# Altium integrated library GPDSE.IntLib: 426 symbols (part 1 of 5)
Pins are listed as number, name and electrical type; pins without a type are passive.

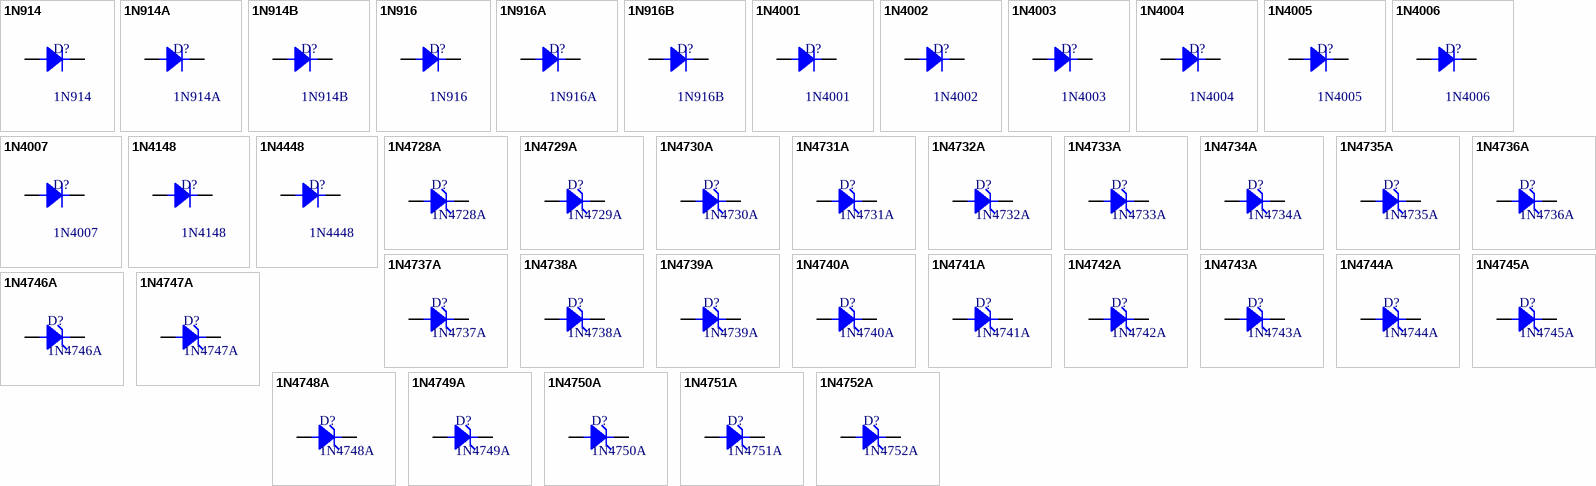
[diagram p0: symbols 1N914 to 1N4752A]

## 1N914
designator D?
Small Signal Diode; Peak Repetitive Reverse Voltage (Vrrm): 100 V; Forward Current (If): 300 mA; Non-Repetitive Peak Forward Surge Current (Ifsm): 1 A; Forward Voltage (Vf): 1 V; Reverse Current (Ir): 25 nA; Total Capacitance (Ct): 4 pF; Max Recovery Time (trr): 4ns
footprint DO-35-Glass (Diode, Axial; Body 3.8 x 1.9 mm (LxDia. max), Lead Dia. 0.53 mm (max), Lead Spacing 7.62 mm)
pins: A, K

## 1N914A
designator D?
Small Signal Diode; Peak Repetitive Reverse Voltage (Vrrm): 100 V; Forward Current (If): 300 mA; Non-Repetitive Peak Forward Surge Current (Ifsm): 1 A; Forward Voltage (Vf): 1 V; Reverse Current (Ir): 25 nA; Total Capacitance (Ct): 4 pF; Max Recovery Time (trr): 4ns
footprint DO-35-Glass (Diode, Axial; Body 3.8 x 1.9 mm (LxDia. max), Lead Dia. 0.53 mm (max), Lead Spacing 7.62 mm)
pins: A, K

## 1N914B
designator D?
Small Signal Diode; Peak Repetitive Reverse Voltage (Vrrm): 100 V; Forward Current (If): 300 mA; Non-Repetitive Peak Forward Surge Current (Ifsm): 1 A; Forward Voltage (Vf): 0.72 V; Reverse Current (Ir): 25 nA; Total Capacitance (Ct): 4 pF; Max Recovery Time (trr): 4ns
footprint DO-35-Glass (Diode, Axial; Body 3.8 x 1.9 mm (LxDia. max), Lead Dia. 0.53 mm (max), Lead Spacing 7.62 mm)
pins: A, K

## 1N916
designator D?
Small Signal Diode; Peak Repetitive Reverse Voltage (Vrrm): 100 V; Forward Current (If): 300 mA; Non-Repetitive Peak Forward Surge Current (Ifsm): 1 A; Forward Voltage (Vf): 1 V; Reverse Current (Ir): 25 nA; Total Capacitance (Ct): 2 pF; Max Recovery Time (trr): 4ns
footprint DO-35-Glass (Diode, Axial; Body 3.8 x 1.9 mm (LxDia. max), Lead Dia. 0.53 mm (max), Lead Spacing 7.62 mm)
pins: A, K

## 1N916A
designator D?
Small Signal Diode; Peak Repetitive Reverse Voltage (Vrrm): 100 V; Forward Current (If): 300 mA; Non-Repetitive Peak Forward Surge Current (Ifsm): 1 A; Forward Voltage (Vf): 1 V; Reverse Current (Ir): 25 nA; Total Capacitance (Ct): 2 pF; Max Recovery Time (trr): 4ns
footprint DO-35-Glass (Diode, Axial; Body 3.8 x 1.9 mm (LxDia. max), Lead Dia. 0.53 mm (max), Lead Spacing 7.62 mm)
pins: A, K

## 1N916B
designator D?
Small Signal Diode; Peak Repetitive Reverse Voltage (Vrrm): 100 V; Forward Current (If): 300 mA; Non-Repetitive Peak Forward Surge Current (Ifsm): 1 A; Forward Voltage (Vf): 0.73 V; Reverse Current (Ir): 25 nA; Total Capacitance (Ct): 2 pF; Max Recovery Time (trr): 4ns
footprint DO-35-Glass (Diode, Axial; Body 3.8 x 1.9 mm (LxDia. max), Lead Dia. 0.53 mm (max), Lead Spacing 7.62 mm)
pins: A, K

## 1N4001
designator D?
General Purpose Rectifier; Peak Repetitive Reverse Voltage (Vrrm): 50 V; Forward Current (If): 1 A; Non-Repetitive Peak Forward Surge Current (Ifsm): 30 A; Forward Voltage (Vf): 1.1 V; Reverse Current (Ir): 5 uA; Total Capacitance (Ct): 15 pF
footprint DO-41-Plastic (Diode, Axial; Body 4.1 x 2.6 mm (LxDia. max), Lead Dia. 1.14 mm (max), Lead Spacing 7.62 mm)
pins: A, K

## 1N4002
designator D?
General Purpose Rectifier; Peak Repetitive Reverse Voltage (Vrrm): 100 V; Forward Current (If): 1 A; Non-Repetitive Peak Forward Surge Current (Ifsm): 30 A; Forward Voltage (Vf): 1.1 V; Reverse Current (Ir): 5 uA; Total Capacitance (Ct): 15 pF
footprint DO-41-Plastic (Diode, Axial; Body 4.1 x 2.6 mm (LxDia. max), Lead Dia. 1.14 mm (max), Lead Spacing 7.62 mm)
pins: A, K

## 1N4003
designator D?
General Purpose Rectifier; Peak Repetitive Reverse Voltage (Vrrm): 200 V; Forward Current (If): 1 A; Non-Repetitive Peak Forward Surge Current (Ifsm): 30 A; Forward Voltage (Vf): 1.1 V; Reverse Current (Ir): 5 uA; Total Capacitance (Ct): 15 pF
footprint DO-41-Plastic (Diode, Axial; Body 4.1 x 2.6 mm (LxDia. max), Lead Dia. 1.14 mm (max), Lead Spacing 7.62 mm)
pins: A, K

## 1N4004
designator D?
General Purpose Rectifier; Peak Repetitive Reverse Voltage (Vrrm): 400 V; Forward Current (If): 1 A; Non-Repetitive Peak Forward Surge Current (Ifsm): 30 A; Forward Voltage (Vf): 1.1 V; Reverse Current (Ir): 5 uA; Total Capacitance (Ct): 15 pF
footprint DO-41-Plastic (Diode, Axial; Body 4.1 x 2.6 mm (LxDia. max), Lead Dia. 1.14 mm (max), Lead Spacing 7.62 mm)
pins: A, K

## 1N4005
designator D?
General Purpose Rectifier; Peak Repetitive Reverse Voltage (Vrrm): 600 V; Forward Current (If): 1 A; Non-Repetitive Peak Forward Surge Current (Ifsm): 30 A; Forward Voltage (Vf): 1.1 V; Reverse Current (Ir): 5 uA; Total Capacitance (Ct): 15 pF
footprint DO-41-Plastic (Diode, Axial; Body 4.1 x 2.6 mm (LxDia. max), Lead Dia. 1.14 mm (max), Lead Spacing 7.62 mm)
pins: A, K

## 1N4006
designator D?
General Purpose Rectifier; Peak Repetitive Reverse Voltage (Vrrm): 800 V; Forward Current (If): 1 A; Non-Repetitive Peak Forward Surge Current (Ifsm): 30 A; Forward Voltage (Vf): 1.1 V; Reverse Current (Ir): 5 uA; Total Capacitance (Ct): 15 pF
footprint DO-41-Plastic (Diode, Axial; Body 4.1 x 2.6 mm (LxDia. max), Lead Dia. 1.14 mm (max), Lead Spacing 7.62 mm)
pins: A, K

## 1N4007
designator D?
General Purpose Rectifier; Peak Repetitive Reverse Voltage (Vrrm): 1000 V; Forward Current (If): 1 A; Non-Repetitive Peak Forward Surge Current (Ifsm): 30 A; Forward Voltage (Vf): 1.1 V; Reverse Current (Ir): 5 uA; Total Capacitance (Ct): 15 pF
footprint DO-41-Plastic (Diode, Axial; Body 4.1 x 2.6 mm (LxDia. max), Lead Dia. 1.14 mm (max), Lead Spacing 7.62 mm)
pins: A, K

## 1N4148
designator D?
Small Signal Diode; Peak Repetitive Reverse Voltage (Vrrm): 100 V; Forward Current (If): 300 mA; Non-Repetitive Peak Forward Surge Current (Ifsm): 1 A; Forward Voltage (Vf): 1 V; Reverse Current (Ir): 25 nA; Total Capacitance (Ct): 4 pF; Max Recovery Time (trr): 4ns
footprint DO-35-Glass (Diode, Axial; Body 3.8 x 1.9 mm (LxDia. max), Lead Dia. 0.53 mm (max), Lead Spacing 7.62 mm)
pins: A, K

## 1N4448
designator D?
Small Signal Diode; Peak Repetitive Reverse Voltage (Vrrm): 100 V; Forward Current (If): 300 mA; Non-Repetitive Peak Forward Surge Current (Ifsm): 1 A; Forward Voltage (Vf): 1 V; Reverse Current (Ir): 25 nA; Total Capacitance (Ct): 2 pF; Max Recovery Time (trr): 4ns
footprint DO-35-Glass (Diode, Axial; Body 3.8 x 1.9 mm (LxDia. max), Lead Dia. 0.53 mm (max), Lead Spacing 7.62 mm)
pins: A, K

## 1N4728A
designator D?
Zener Diode; Zener Voltage (Vz): 3.3 V; Zener Current (Iz): 276 mA; Power Dissipation (Pd): 1.3 W; Forward Voltage (Vf): 1.2 V
footprint DO-41-Glass (Diode, Axial; Body 4.1 x 2.6 mm (LxDia. max), Lead Dia. 1.14 mm (max), Lead Spacing 7.62 mm)
pins: A, K

## 1N4729A
designator D?
Zener Diode; Zener Voltage (Vz): 3.6 V; Zener Current (Iz): 252 mA; Power Dissipation (Pd): 1.3 W; Forward Voltage (Vf): 1.2 V
footprint DO-41-Glass (Diode, Axial; Body 4.1 x 2.6 mm (LxDia. max), Lead Dia. 1.14 mm (max), Lead Spacing 7.62 mm)
pins: A, K

## 1N4730A
designator D?
Zener Diode; Zener Voltage (Vz): 3.9 V; Zener Current (Iz): 234 mA; Power Dissipation (Pd): 1.3 W; Forward Voltage (Vf): 1.2 V
footprint DO-41-Glass (Diode, Axial; Body 4.1 x 2.6 mm (LxDia. max), Lead Dia. 1.14 mm (max), Lead Spacing 7.62 mm)
pins: A, K

## 1N4731A
designator D?
Zener Diode; Zener Voltage (Vz): 4.3 V; Zener Current (Iz): 217 mA; Power Dissipation (Pd): 1.3 W; Forward Voltage (Vf): 1.2 V
footprint DO-41-Glass (Diode, Axial; Body 4.1 x 2.6 mm (LxDia. max), Lead Dia. 1.14 mm (max), Lead Spacing 7.62 mm)
pins: A, K

## 1N4732A
designator D?
Zener Diode; Zener Voltage (Vz): 4.7 V; Zener Current (Iz): 193 mA; Power Dissipation (Pd): 1.3 W; Forward Voltage (Vf): 1.2 V
footprint DO-41-Glass (Diode, Axial; Body 4.1 x 2.6 mm (LxDia. max), Lead Dia. 1.14 mm (max), Lead Spacing 7.62 mm)
pins: A, K

## 1N4733A
designator D?
Zener Diode; Zener Voltage (Vz): 5.1 V; Zener Current (Iz): 178 mA; Power Dissipation (Pd): 1.3 W; Forward Voltage (Vf): 1.2 V
footprint DO-41-Glass (Diode, Axial; Body 4.1 x 2.6 mm (LxDia. max), Lead Dia. 1.14 mm (max), Lead Spacing 7.62 mm)
pins: A, K

## 1N4734A
designator D?
Zener Diode; Zener Voltage (Vz): 5.6 V; Zener Current (Iz): 162 mA; Power Dissipation (Pd): 1.3 W; Forward Voltage (Vf): 1.2 V
footprint DO-41-Glass (Diode, Axial; Body 4.1 x 2.6 mm (LxDia. max), Lead Dia. 1.14 mm (max), Lead Spacing 7.62 mm)
pins: A, K

## 1N4735A
designator D?
Zener Diode; Zener Voltage (Vz): 6.2 V; Zener Current (Iz): 146 mA; Power Dissipation (Pd): 1.3 W; Forward Voltage (Vf): 1.2 V
footprint DO-41-Glass (Diode, Axial; Body 4.1 x 2.6 mm (LxDia. max), Lead Dia. 1.14 mm (max), Lead Spacing 7.62 mm)
pins: A, K

## 1N4736A
designator D?
Zener Diode; Zener Voltage (Vz): 6.8 V; Zener Current (Iz): 133 mA; Power Dissipation (Pd): 1.3 W; Forward Voltage (Vf): 1.2 V
footprint DO-41-Glass (Diode, Axial; Body 4.1 x 2.6 mm (LxDia. max), Lead Dia. 1.14 mm (max), Lead Spacing 7.62 mm)
pins: A, K

## 1N4737A
designator D?
Zener Diode; Zener Voltage (Vz): 7.5 V; Zener Current (Iz): 121 mA; Power Dissipation (Pd): 1.3 W; Forward Voltage (Vf): 1.2 V
footprint DO-41-Glass (Diode, Axial; Body 4.1 x 2.6 mm (LxDia. max), Lead Dia. 1.14 mm (max), Lead Spacing 7.62 mm)
pins: A, K

## 1N4738A
designator D?
Zener Diode; Zener Voltage (Vz): 8.2 V; Zener Current (Iz): 110 mA; Power Dissipation (Pd): 1.3 W; Forward Voltage (Vf): 1.2 V
footprint DO-41-Glass (Diode, Axial; Body 4.1 x 2.6 mm (LxDia. max), Lead Dia. 1.14 mm (max), Lead Spacing 7.62 mm)
pins: A, K

## 1N4739A
designator D?
Zener Diode; Zener Voltage (Vz): 9.1 V; Zener Current (Iz): 100 mA; Power Dissipation (Pd): 1.3 W; Forward Voltage (Vf): 1.2 V
footprint DO-41-Glass (Diode, Axial; Body 4.1 x 2.6 mm (LxDia. max), Lead Dia. 1.14 mm (max), Lead Spacing 7.62 mm)
pins: A, K

## 1N4740A
designator D?
Zener Diode; Zener Voltage (Vz): 10 V; Zener Current (Iz): 91 mA; Power Dissipation (Pd): 1.3 W; Forward Voltage (Vf): 1.2 V
footprint DO-41-Glass (Diode, Axial; Body 4.1 x 2.6 mm (LxDia. max), Lead Dia. 1.14 mm (max), Lead Spacing 7.62 mm)
pins: A, K

## 1N4741A
designator D?
Zener Diode; Zener Voltage (Vz): 11 V; Zener Current (Iz): 83 mA; Power Dissipation (Pd): 1.3 W; Forward Voltage (Vf): 1.2 V
footprint DO-41-Glass (Diode, Axial; Body 4.1 x 2.6 mm (LxDia. max), Lead Dia. 1.14 mm (max), Lead Spacing 7.62 mm)
pins: A, K

## 1N4742A
designator D?
Zener Diode; Zener Voltage (Vz): 12 V; Zener Current (Iz): 76 mA; Power Dissipation (Pd): 1.3 W; Forward Voltage (Vf): 1.2 V
footprint DO-41-Glass (Diode, Axial; Body 4.1 x 2.6 mm (LxDia. max), Lead Dia. 1.14 mm (max), Lead Spacing 7.62 mm)
pins: A, K

## 1N4743A
designator D?
Zener Diode; Zener Voltage (Vz): 13 V; Zener Current (Iz): 69 mA; Power Dissipation (Pd): 1.3 W; Forward Voltage (Vf): 1.2 V
footprint DO-41-Glass (Diode, Axial; Body 4.1 x 2.6 mm (LxDia. max), Lead Dia. 1.14 mm (max), Lead Spacing 7.62 mm)
pins: A, K

## 1N4744A
designator D?
Zener Diode; Zener Voltage (Vz): 15 V; Zener Current (Iz): 61 mA; Power Dissipation (Pd): 1.3 W; Forward Voltage (Vf): 1.2 V
footprint DO-41-Glass (Diode, Axial; Body 4.1 x 2.6 mm (LxDia. max), Lead Dia. 1.14 mm (max), Lead Spacing 7.62 mm)
pins: A, K

## 1N4745A
designator D?
Zener Diode; Zener Voltage (Vz): 16 V; Zener Current (Iz): 57 mA; Power Dissipation (Pd): 1.3 W; Forward Voltage (Vf): 1.2 V
footprint DO-41-Glass (Diode, Axial; Body 4.1 x 2.6 mm (LxDia. max), Lead Dia. 1.14 mm (max), Lead Spacing 7.62 mm)
pins: A, K

## 1N4746A
designator D?
Zener Diode; Zener Voltage (Vz): 18 V; Zener Current (Iz): 50 mA; Power Dissipation (Pd): 1.3 W; Forward Voltage (Vf): 1.2 V
footprint DO-41-Glass (Diode, Axial; Body 4.1 x 2.6 mm (LxDia. max), Lead Dia. 1.14 mm (max), Lead Spacing 7.62 mm)
pins: A, K

## 1N4747A
designator D?
Zener Diode; Zener Voltage (Vz): 20 V; Zener Current (Iz): 45 mA; Power Dissipation (Pd): 1.3 W; Forward Voltage (Vf): 1.2 V
footprint DO-41-Glass (Diode, Axial; Body 4.1 x 2.6 mm (LxDia. max), Lead Dia. 1.14 mm (max), Lead Spacing 7.62 mm)
pins: A, K

## 1N4748A
designator D?
Zener Diode; Zener Voltage (Vz): 22 V; Zener Current (Iz): 41 mA; Power Dissipation (Pd): 1.3 W; Forward Voltage (Vf): 1.2 V
footprint DO-41-Glass (Diode, Axial; Body 4.1 x 2.6 mm (LxDia. max), Lead Dia. 1.14 mm (max), Lead Spacing 7.62 mm)
pins: A, K

## 1N4749A
designator D?
Zener Diode; Zener Voltage (Vz): 24 V; Zener Current (Iz): 38 mA; Power Dissipation (Pd): 1.3 W; Forward Voltage (Vf): 1.2 V
footprint DO-41-Glass (Diode, Axial; Body 4.1 x 2.6 mm (LxDia. max), Lead Dia. 1.14 mm (max), Lead Spacing 7.62 mm)
pins: A, K

## 1N4750A
designator D?
Zener Diode; Zener Voltage (Vz): 27 V; Zener Current (Iz): 34 mA; Power Dissipation (Pd): 1.3 W; Forward Voltage (Vf): 1.2 V
footprint DO-41-Glass (Diode, Axial; Body 4.1 x 2.6 mm (LxDia. max), Lead Dia. 1.14 mm (max), Lead Spacing 7.62 mm)
pins: A, K

## 1N4751A
designator D?
Zener Diode; Zener Voltage (Vz): 30 V; Zener Current (Iz): 30 mA; Power Dissipation (Pd): 1.3 W; Forward Voltage (Vf): 1.2 V
footprint DO-41-Glass (Diode, Axial; Body 4.1 x 2.6 mm (LxDia. max), Lead Dia. 1.14 mm (max), Lead Spacing 7.62 mm)
pins: A, K

## 1N4752A
designator D?
Zener Diode; Zener Voltage (Vz): 33 V; Zener Current (Iz): 27 mA; Power Dissipation (Pd): 1.3 W; Forward Voltage (Vf): 1.2 V
footprint DO-41-Glass (Diode, Axial; Body 4.1 x 2.6 mm (LxDia. max), Lead Dia. 1.14 mm (max), Lead Spacing 7.62 mm)
pins: A, K

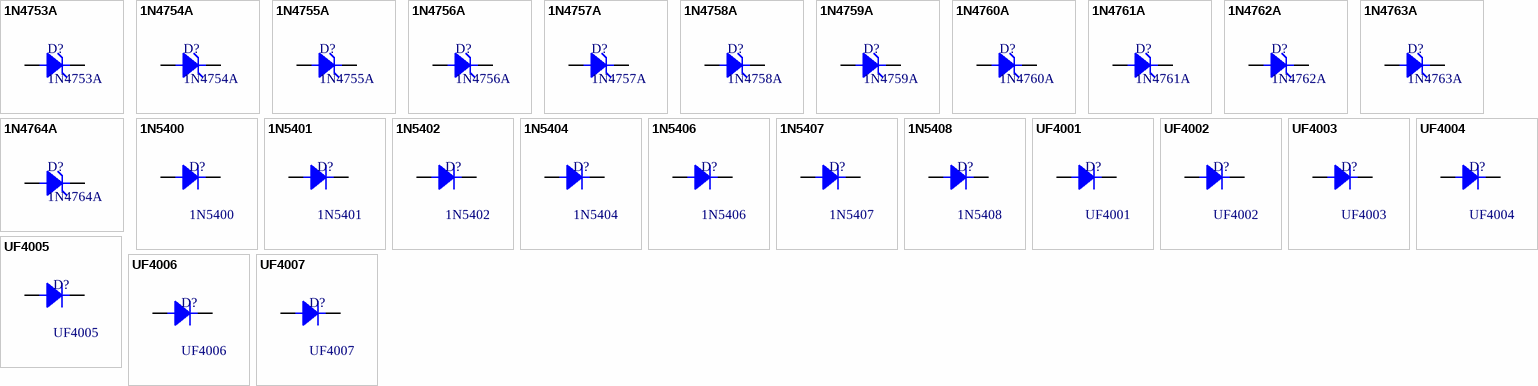
[diagram p1: symbols 1N4753A to UF4007]

## 1N4753A
designator D?
Zener Diode; Zener Voltage (Vz): 36 V; Zener Current (Iz): 25 mA; Power Dissipation (Pd): 1.3 W; Forward Voltage (Vf): 1.2 V
footprint DO-41-Glass (Diode, Axial; Body 4.1 x 2.6 mm (LxDia. max), Lead Dia. 1.14 mm (max), Lead Spacing 7.62 mm)
pins: A, K

## 1N4754A
designator D?
Zener Diode; Zener Voltage (Vz): 39 V; Zener Current (Iz): 23 mA; Power Dissipation (Pd): 1.3 W; Forward Voltage (Vf): 1.2 V
footprint DO-41-Glass (Diode, Axial; Body 4.1 x 2.6 mm (LxDia. max), Lead Dia. 1.14 mm (max), Lead Spacing 7.62 mm)
pins: A, K

## 1N4755A
designator D?
Zener Diode; Zener Voltage (Vz): 43 V; Zener Current (Iz): 22 mA; Power Dissipation (Pd): 1.3 W; Forward Voltage (Vf): 1.2 V
footprint DO-41-Glass (Diode, Axial; Body 4.1 x 2.6 mm (LxDia. max), Lead Dia. 1.14 mm (max), Lead Spacing 7.62 mm)
pins: A, K

## 1N4756A
designator D?
Zener Diode; Zener Voltage (Vz): 47 V; Zener Current (Iz): 19 mA; Power Dissipation (Pd): 1.3 W; Forward Voltage (Vf): 1.2 V
footprint DO-41-Glass (Diode, Axial; Body 4.1 x 2.6 mm (LxDia. max), Lead Dia. 1.14 mm (max), Lead Spacing 7.62 mm)
pins: A, K

## 1N4757A
designator D?
Zener Diode; Zener Voltage (Vz): 51 V; Zener Current (Iz): 18 mA; Power Dissipation (Pd): 1.3 W; Forward Voltage (Vf): 1.2 V
footprint DO-41-Glass (Diode, Axial; Body 4.1 x 2.6 mm (LxDia. max), Lead Dia. 1.14 mm (max), Lead Spacing 7.62 mm)
pins: A, K

## 1N4758A
designator D?
Zener Diode; Zener Voltage (Vz): 56 V; Zener Current (Iz): 16 mA; Power Dissipation (Pd): 1.3 W; Forward Voltage (Vf): 1.2 V
footprint DO-41-Glass (Diode, Axial; Body 4.1 x 2.6 mm (LxDia. max), Lead Dia. 1.14 mm (max), Lead Spacing 7.62 mm)
pins: A, K

## 1N4759A
designator D?
Zener Diode; Zener Voltage (Vz): 62 V; Zener Current (Iz): 14 mA; Power Dissipation (Pd): 1.3 W; Forward Voltage (Vf): 1.2 V
footprint DO-41-Glass (Diode, Axial; Body 4.1 x 2.6 mm (LxDia. max), Lead Dia. 1.14 mm (max), Lead Spacing 7.62 mm)
pins: A, K

## 1N4760A
designator D?
Zener Diode; Zener Voltage (Vz): 68 V; Zener Current (Iz): 13 mA; Power Dissipation (Pd): 1.3 W; Forward Voltage (Vf): 1.2 V
footprint DO-41-Glass (Diode, Axial; Body 4.1 x 2.6 mm (LxDia. max), Lead Dia. 1.14 mm (max), Lead Spacing 7.62 mm)
pins: A, K

## 1N4761A
designator D?
Zener Diode; Zener Voltage (Vz): 75 V; Zener Current (Iz): 12 mA; Power Dissipation (Pd): 1.3 W; Forward Voltage (Vf): 1.2 V
footprint DO-41-Glass (Diode, Axial; Body 4.1 x 2.6 mm (LxDia. max), Lead Dia. 1.14 mm (max), Lead Spacing 7.62 mm)
pins: A, K

## 1N4762A
designator D?
Zener Diode; Zener Voltage (Vz): 82 V; Zener Current (Iz): 11 mA; Power Dissipation (Pd): 1.3 W; Forward Voltage (Vf): 1.2 V
footprint DO-41-Glass (Diode, Axial; Body 4.1 x 2.6 mm (LxDia. max), Lead Dia. 1.14 mm (max), Lead Spacing 7.62 mm)
pins: A, K

## 1N4763A
designator D?
Zener Diode; Zener Voltage (Vz): 91 V; Zener Current (Iz): 10 mA; Power Dissipation (Pd): 1.3 W; Forward Voltage (Vf): 1.2 V
footprint DO-41-Glass (Diode, Axial; Body 4.1 x 2.6 mm (LxDia. max), Lead Dia. 1.14 mm (max), Lead Spacing 7.62 mm)
pins: A, K

## 1N4764A
designator D?
Zener Diode; Zener Voltage (Vz): 100 V; Zener Current (Iz): 9 mA; Power Dissipation (Pd): 1.3 W; Forward Voltage (Vf): 1.2 V
footprint DO-41-Glass (Diode, Axial; Body 4.1 x 2.6 mm (LxDia. max), Lead Dia. 1.14 mm (max), Lead Spacing 7.62 mm)
pins: A, K

## 1N5400
designator D?
3 Amp Rectifier; Forward Current (If): 3 A; Forward Voltage (Vf): 1 V; Non-Repetitive Peak Forward Surge Current (Ifsm): 200 A; Peak Repetitive Reverse Voltage (Vrrm): 50 V; Reverse Current (Ir): 10 uA; Total Capacitance (Ct): 50 pF
footprint DO-201-Plastic (Diode, Axial; Body 9.5 x 5.3 mm (LxDia. max), Lead Dia. 1.30 mm (max), Lead Spacing 15.24 mm)
pins: A, K

## 1N5401
designator D?
3 Amp Rectifier; Forward Current (If): 3 A; Forward Voltage (Vf): 1 V; Non-Repetitive Peak Forward Surge Current (Ifsm): 200 A; Peak Repetitive Reverse Voltage (Vrrm): 100 V; Reverse Current (Ir): 10 uA; Total Capacitance (Ct): 50 pF
footprint DO-201-Plastic (Diode, Axial; Body 9.5 x 5.3 mm (LxDia. max), Lead Dia. 1.30 mm (max), Lead Spacing 15.24 mm)
pins: A, K

## 1N5402
designator D?
3 Amp Rectifier; Forward Current (If): 3 A; Forward Voltage (Vf): 1 V; Non-Repetitive Peak Forward Surge Current (Ifsm): 200 A; Peak Repetitive Reverse Voltage (Vrrm): 200 V; Reverse Current (Ir): 10 uA; Total Capacitance (Ct): 50 pF
footprint DO-201-Plastic (Diode, Axial; Body 9.5 x 5.3 mm (LxDia. max), Lead Dia. 1.30 mm (max), Lead Spacing 15.24 mm)
pins: A, K

## 1N5404
designator D?
3 Amp Rectifier; Forward Current (If): 3 A; Forward Voltage (Vf): 1 V; Non-Repetitive Peak Forward Surge Current (Ifsm): 200 A; Peak Repetitive Reverse Voltage (Vrrm): 400 V; Reverse Current (Ir): 10 uA; Total Capacitance (Ct): 50 pF
footprint DO-201-Plastic (Diode, Axial; Body 9.5 x 5.3 mm (LxDia. max), Lead Dia. 1.30 mm (max), Lead Spacing 15.24 mm)
pins: A, K

## 1N5406
designator D?
3 Amp Rectifier; Forward Current (If): 3 A; Forward Voltage (Vf): 1 V; Non-Repetitive Peak Forward Surge Current (Ifsm): 200 A; Peak Repetitive Reverse Voltage (Vrrm): 600 V; Reverse Current (Ir): 10 uA; Total Capacitance (Ct): 25 pF
footprint DO-201-Plastic (Diode, Axial; Body 9.5 x 5.3 mm (LxDia. max), Lead Dia. 1.30 mm (max), Lead Spacing 15.24 mm)
pins: A, K

## 1N5407
designator D?
3 Amp Rectifier; Forward Current (If): 3 A; Forward Voltage (Vf): 1 V; Non-Repetitive Peak Forward Surge Current (Ifsm): 200 A; Peak Repetitive Reverse Voltage (Vrrm): 800 V; Reverse Current (Ir): 10 uA; Total Capacitance (Ct): 25 pF
footprint DO-201-Plastic (Diode, Axial; Body 9.5 x 5.3 mm (LxDia. max), Lead Dia. 1.30 mm (max), Lead Spacing 15.24 mm)
pins: A, K

## 1N5408
designator D?
3 Amp Rectifier; Forward Current (If): 3 A; Forward Voltage (Vf): 1 V; Non-Repetitive Peak Forward Surge Current (Ifsm): 200 A; Peak Repetitive Reverse Voltage (Vrrm): 1000 V; Reverse Current (Ir): 10 uA; Total Capacitance (Ct): 25 pF
footprint DO-201-Plastic (Diode, Axial; Body 9.5 x 5.3 mm (LxDia. max), Lead Dia. 1.30 mm (max), Lead Spacing 15.24 mm)
pins: A, K

## UF4001
designator D?
Ultrafast Plastic Rectifier; Peak Repetitive Reverse Voltage (Vrrm): 50 V; Forward Current (If): 1 A; Non-Repetitive Peak Forward Surge Current (Ifsm): 30 A; Forward Voltage (Vf): 1 V; Reverse Current (Ir): 10 uA; Total Capacitance (Ct): 17 pF; Max Recovery Time (trr): 50ns
footprint DO-41-Plastic (Diode, Axial; Body 4.1 x 2.6 mm (LxDia. max), Lead Dia. 1.14 mm (max), Lead Spacing 7.62 mm)
pins: A, K

## UF4002
designator D?
Ultrafast Plastic Rectifier; Peak Repetitive Reverse Voltage (Vrrm): 100 V; Forward Current (If): 1 A; Non-Repetitive Peak Forward Surge Current (Ifsm): 30 A; Forward Voltage (Vf): 1 V; Reverse Current (Ir): 10 uA; Total Capacitance (Ct): 17 pF; Max Recovery Time (trr): 50ns
footprint DO-41-Plastic (Diode, Axial; Body 4.1 x 2.6 mm (LxDia. max), Lead Dia. 1.14 mm (max), Lead Spacing 7.62 mm)
pins: A, K

## UF4003
designator D?
Ultrafast Plastic Rectifier; Peak Repetitive Reverse Voltage (Vrrm): 200 V; Forward Current (If): 1 A; Non-Repetitive Peak Forward Surge Current (Ifsm): 30 A; Forward Voltage (Vf): 1 V; Reverse Current (Ir): 10 uA; Total Capacitance (Ct): 17 pF; Max Recovery Time (trr): 50ns
footprint DO-41-Plastic (Diode, Axial; Body 4.1 x 2.6 mm (LxDia. max), Lead Dia. 1.14 mm (max), Lead Spacing 7.62 mm)
pins: A, K

## UF4004
designator D?
Ultrafast Plastic Rectifier; Peak Repetitive Reverse Voltage (Vrrm): 400 V; Forward Current (If): 1 A; Non-Repetitive Peak Forward Surge Current (Ifsm): 30 A; Forward Voltage (Vf): 1 V; Reverse Current (Ir): 10 uA; Total Capacitance (Ct): 17 pF; Max Recovery Time (trr): 50ns
footprint DO-41-Plastic (Diode, Axial; Body 4.1 x 2.6 mm (LxDia. max), Lead Dia. 1.14 mm (max), Lead Spacing 7.62 mm)
pins: A, K

## UF4005
designator D?
Ultrafast Plastic Rectifier; Peak Repetitive Reverse Voltage (Vrrm): 600 V; Forward Current (If): 1 A; Non-Repetitive Peak Forward Surge Current (Ifsm): 30 A; Forward Voltage (Vf): 1.7 V; Reverse Current (Ir): 10 uA; Total Capacitance (Ct): 17 pF; Max Recovery Time (trr): 74ns
footprint DO-41-Plastic (Diode, Axial; Body 4.1 x 2.6 mm (LxDia. max), Lead Dia. 1.14 mm (max), Lead Spacing 7.62 mm)
pins: A, K

## UF4006
designator D?
Ultrafast Plastic Rectifier; Peak Repetitive Reverse Voltage (Vrrm): 800 V; Forward Current (If): 1 A; Non-Repetitive Peak Forward Surge Current (Ifsm): 30 A; Forward Voltage (Vf): 1.7 V; Reverse Current (Ir): 10 uA; Total Capacitance (Ct): 17 pF; Max Recovery Time (trr): 75ns
footprint DO-41-Plastic (Diode, Axial; Body 4.1 x 2.6 mm (LxDia. max), Lead Dia. 1.14 mm (max), Lead Spacing 7.62 mm)
pins: A, K

## UF4007
designator D?
Ultrafast Plastic Rectifier; Peak Repetitive Reverse Voltage (Vrrm): 1000 V; Forward Current (If): 1 A; Non-Repetitive Peak Forward Surge Current (Ifsm): 30 A; Forward Voltage (Vf): 1.7 V; Reverse Current (Ir): 10 uA; Total Capacitance (Ct): 17 pF; Max Recovery Time (trr): 75ns
footprint DO-41-Plastic (Diode, Axial; Body 4.1 x 2.6 mm (LxDia. max), Lead Dia. 1.14 mm (max), Lead Spacing 7.62 mm)
pins: A, K


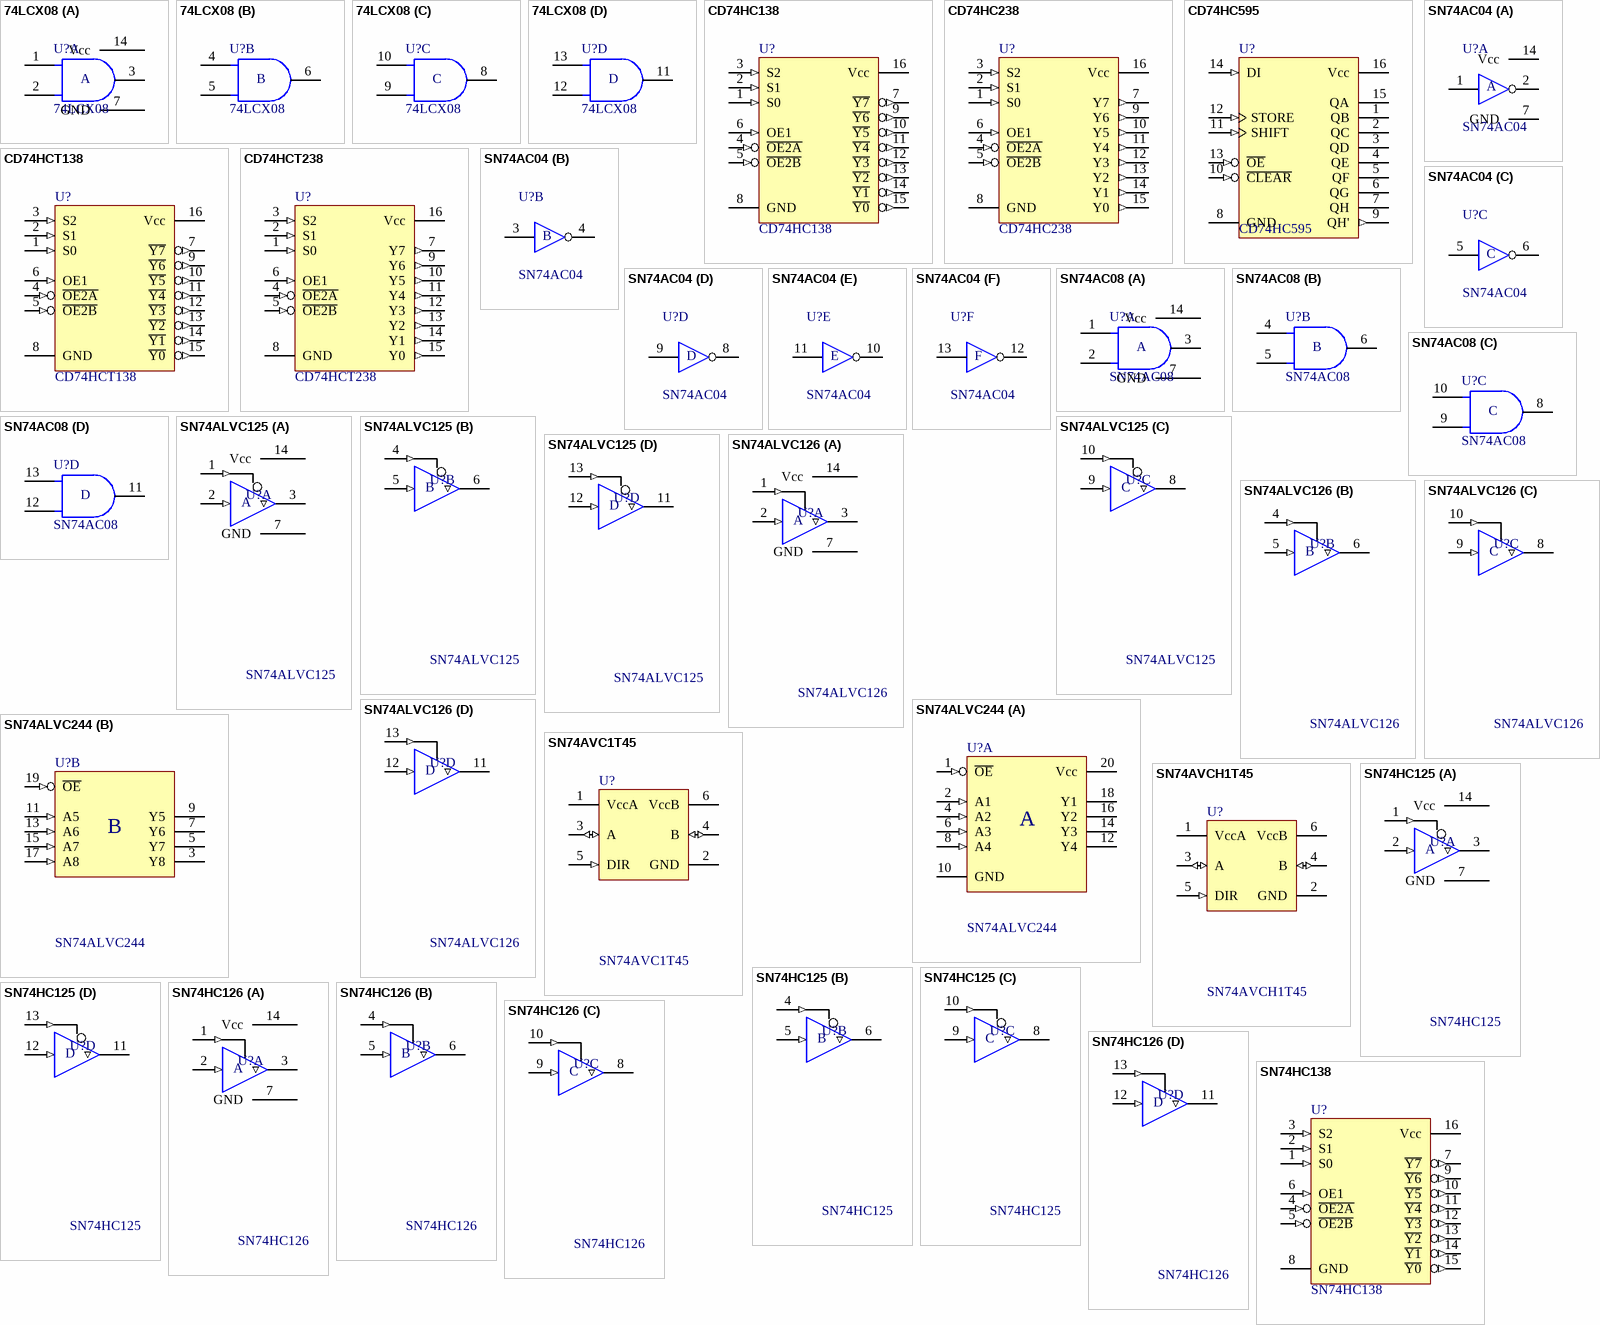
[diagram p2: symbols 74LCX08 to SN74HC138]

## 74LCX08
designator U?
Low Voltage Quad 2-Input AND Gate with 5V Tolerant Inputs; Supply Voltage (Vcc): 2.0 to 3.6 V; Input Voltage (Vi): 0 to 5.5 V; Output Voltage (Vo): 0 to Vcc; Output High Current (Ioh): -24 mA; Output Low Current (Iol): 24 mA; Propagation Delay High-Low (tphl): 5.5ns; Propagation Delay Low-High (tplh): 5.5ns
footprint SOIC14-150(50) (Plastic Small Outline 14 pinos)
footprint SOP14-5.3mm(1.27mm) (Small Outline Package 14 pin)
footprint SOP14-4.4mm(0.65mm) (Thin Shrink Small Outline Package 14 pin)
part A pins: 1 A0, 2 B0, 3 Y0, 7 GND, 14 Vcc
part B pins: 4 A1, 5 B1, 6 Y1
part C pins: 8 Y2, 9 B2, 10 A2
part D pins: 11 Y3, 12 B3, 13 A3
part A text: A
part B text: B
part C text: C
part D text: D

## CD74HC138
designator U?
High Speed CMOS Logic 3-Line to 8-Line Decoder / Demultiplexer Inverting; Supply Voltage (Vcc): 2.0 to 6.0 V; Input Voltage (Vi): 0 to Vcc; Propagation Delay High-Low (tphl): 13ns; Output High Current (Ioh): -25 mA; Output Low Current (Iol): 25 mA; Output Voltage (Vo): 0 to Vcc; Propagation Delay Low-High (tplh): 13ns
footprint SOIC16-150(50) (SOIC; 16 Leads; Row Spacing 3.81 mm; Pitch 1.27 mm; 3D Antonio Fagaldo)
footprint DIP16-300(100) (DIP, 16-Leads, Row Spacing 7.62mm, Pitch 2.54mm, Body 22.86x6.35mm)
pins: 1 S0 (in), 2 S1 (in), 3 S2 (in), 4 ~{OE2A} (in), 5 ~{OE2B} (in), 6 OE1 (in), 7 ~{Y7} (out), 8 GND (power), 9 ~{Y6} (out), 10 ~{Y5} (out), 11 ~{Y4} (out), 12 ~{Y3} (out), 13 ~{Y2} (out), 14 ~{Y1} (out), 15 ~{Y0} (out), 16 Vcc (power)

## CD74HC238
designator U?
High Speed CMOS Logic 3-Line to 8-Line Decoder / Demultiplexer Noninverting; Supply Voltage (Vcc): 2.0 to 6.0 V; Input Voltage (Vi): 0 to Vcc; Propagation Delay High-Low (tphl): 13ns; Output High Current (Ioh): -25 mA; Output Low Current (Iol): 25 mA; Output Voltage (Vo): 0 to Vcc; Propagation Delay Low-High (tplh): 13ns
footprint SOIC16-150(50) (SOIC; 16 Leads; Row Spacing 3.81 mm; Pitch 1.27 mm; 3D Antonio Fagaldo)
footprint DIP16-300(100) (DIP; 16 Leads; Row Spacing 7.62 mm; Pitch 2.54 mm; 3D CircuitWorks)
footprint SOP16-4.4mm(0.65mm) (Footprint not found)
footprint SOP16-5.3mm(1.27mm) (Small Outline Package 16 pin)
pins: 1 S0 (in), 2 S1 (in), 3 S2 (in), 4 ~{OE2A} (in), 5 ~{OE2B} (in), 6 OE1 (in), 7 Y7 (out), 8 GND (power), 9 Y6 (out), 10 Y5 (out), 11 Y4 (out), 12 Y3 (out), 13 Y2 (out), 14 Y1 (out), 15 Y0 (out), 16 Vcc (power)

## CD74HC595
designator U?
8-Bit Shift Register with 3-State Output Registers; Supply Voltage (Vcc): 2.0 to 6.0 V; Input Voltage (Vi): 0 to Vcc; Output High Current (Ioh): -6 mA; Output Low Current (Iol): 6 mA; Clock Frequency (fclock): 31 MHz; Output Voltage (Vo): 0 to Vcc
footprint SOIC16-150(50) (SOIC; 16 Leads; Row Spacing 3.81 mm; Pitch 1.27 mm; 3D Antonio Fagaldo)
footprint DIP16-300(100) (DIP, 16-Leads, Row Spacing 7.62mm, Pitch 2.54mm, Body 22.86x6.35mm)
footprint SOP16-5.3mm(0.65mm) (Footprint not found)
footprint SOIC16-300(50) (Footprint not found)
footprint SOP16-5.3mm(1.27mm) (Footprint not found)
pins: 1 QB (hiz), 2 QC (hiz), 3 QD (hiz), 4 QE (hiz), 5 QF (hiz), 6 QG (hiz), 7 QH (hiz), 8 GND (power), 9 QH' (out), 10 ~{CLEAR} (in), 11 SHIFT (in), 12 STORE (in), 13 ~{OE} (in), 14 DI (in), 15 QA (hiz), 16 Vcc (power)

## CD74HCT138
designator U?
High Speed CMOS Logic 3-Line to 8-Line Decoder / Demultiplexer Inverting; Supply Voltage (Vcc): 4.5 to 5.5 V; Input Voltage (Vi): 0 to Vcc; Propagation Delay High-Low (tphl): 14ns; Output High Current (Ioh): -25 mA; Output Low Current (Iol): 25 mA; Output Voltage (Vo): 0 to Vcc; Propagation Delay Low-High (tplh): 14ns
footprint SOIC16-150(50) (SOIC; 16 Leads; Row Spacing 3.81 mm; Pitch 1.27 mm; 3D Antonio Fagaldo)
footprint DIP16-300(100) (DIP; 16 Leads; Row Spacing 7.62 mm; Pitch 2.54 mm; 3D CircuitWorks)
pins: 1 S0 (in), 2 S1 (in), 3 S2 (in), 4 ~{OE2A} (in), 5 ~{OE2B} (in), 6 OE1 (in), 7 ~{Y7} (out), 8 GND (power), 9 ~{Y6} (out), 10 ~{Y5} (out), 11 ~{Y4} (out), 12 ~{Y3} (out), 13 ~{Y2} (out), 14 ~{Y1} (out), 15 ~{Y0} (out), 16 Vcc (power)

## CD74HCT238
designator U?
High Speed CMOS Logic 3-Line to 8-Line Decoder / Demultiplexer Noninverting; Supply Voltage (Vcc): 4.5 to 5.5 V; Input Voltage (Vi): 0 to Vcc; Propagation Delay High-Low (tphl): 14ns; Output High Current (Ioh): -25 mA; Output Low Current (Iol): 25 mA; Output Voltage (Vo): 0 to Vcc; Propagation Delay Low-High (tplh): 14ns
footprint SOIC16-150(50) (SOIC; 16 Leads; Row Spacing 3.81 mm; Pitch 1.27 mm; 3D Antonio Fagaldo)
footprint DIP16-300(100) (DIP; 16 Leads; Row Spacing 7.62 mm; Pitch 2.54 mm; 3D CircuitWorks)
pins: 1 S0 (in), 2 S1 (in), 3 S2 (in), 4 ~{OE2A} (in), 5 ~{OE2B} (in), 6 OE1 (in), 7 Y7 (out), 8 GND (power), 9 Y6 (out), 10 Y5 (out), 11 Y4 (out), 12 Y3 (out), 13 Y2 (out), 14 Y1 (out), 15 Y0 (out), 16 Vcc (power)

## SN74AC04
designator U?
6x Logic Inverter; Input Voltage (Vi): 0 to Vcc; Output High Current (Ioh): -24 mA; Output Low Current (Iol): 24 mA; Propagation Delay High-Low (tphl): 9.5ns; Propagation Delay Low-High (tplh): 10ns; Supply Voltage (Vcc): 2.0 to 6.0 V; Output Voltage (Vo): 0 to Vcc
footprint DIP14-300(100) (DIP, 14-Leads, Row Spacing 7.62mm, Pitch 2.54mm)
footprint SOIC14-150(50) (Plastic Small Outline 14 pinos)
footprint SOP14-5.3mm(1.27mm) (Small Outline Package 14 pin)
footprint SOP14-5.3mm(0.65mm) (Small Outline Package 14 pin)
footprint SOP14-4.4mm(0.65mm) (Thin Shrink Small Outline Package 14 pin)
part A pins: 1 2A, 2 2Y, 7 GND (power), 14 Vcc (power)
part B pins: 3 2A, 4 2Y
part C pins: 5 3A, 6 3Y
part D pins: 8 4Y, 9 4A
part E pins: 10 5Y, 11 5A
part F pins: 12 6Y, 13 6A
part A text: A
part B text: B
part C text: C
part D text: D
part E text: E
part F text: F

## SN74AC08
designator U?
Quad 2-Input AND Gate; Supply Voltage (Vcc): 2.0 to 6.0 V; Input Voltage (Vi): 0 to Vcc; Output High Current (Ioh): -24 mA; Output Low Current (Iol): 24 mA; Propagation Delay High-Low (tphl): 9ns; Propagation Delay Low-High (tplh): 10ns; Output Voltage (Vo): 0 to Vcc
footprint DIP14-300(100) (DIP, 14-Leads, Row Spacing 7.62mm, Pitch 2.54mm)
footprint SOIC14-150(50) (SOIC 14 Leads; Row Spacing 3.81 mm; Pitch 1.27 mm; 3D André L´Hérault)
footprint SOP14-4.4mm(0.65mm) (Thin Shrink Small Outline Package 14 pin)
footprint SOP14-5.3mm(1.27mm) (Small Outline Package 14 pin)
footprint SOP14-5.3mm(0.65mm) (Small Outline Package 14 pin)
part A pins: 1 A0, 2 B0, 3 Y0, 7 GND, 14 Vcc
part B pins: 4 A1, 5 B1, 6 Y1
part C pins: 8 Y2, 9 B2, 10 A2
part D pins: 11 Y3, 12 B3, 13 A3
part A text: A
part B text: B
part C text: C
part D text: D

## SN74ALVC125
designator U?
Quadruple Bus Buffer Gates with 3-State Outputs; Supply Voltage (Vcc): 1.65 to 3.6 V; Input Voltage (Vi): 0 to 4.6 V; Output Voltage (Vo): 0 to Vcc; Output High Current (Ioh): -24 mA; Output Low Current (Iol): 24 mA; Propagation Delay (tpd): 2.8ns
footprint SOIC14-150(50) (SOIC 14 Leads; Row Spacing 3.81 mm; Pitch 1.27 mm; 3D André L´Hérault)
footprint SOP14-5.3mm(1.27mm) (Small Outline Package 14 pin)
footprint SOP14-4.4mm(0.65mm) (Thin Shrink Small Outline Package 14 pin)
footprint SOP14-4.4mm(0.4mm) (Footprint not found)
part A pins: 1 OE1 (in), 2 A1 (in), 3 Y1 (hiz), 7 GND, 14 Vcc
part B pins: 4 OE2 (in), 5 A2 (in), 6 Y2 (hiz)
part C pins: 8 Y3 (hiz), 9 A3 (in), 10 OE3 (in)
part D pins: 11 Y4 (hiz), 12 A4 (in), 13 OE4 (in)
part A text: A
part B text: B
part C text: C
part D text: D

## SN74ALVC126
designator U?
Quadruple Bus Buffer Gates with 3-State Outputs; Supply Voltage (Vcc): 1.65 to 3.6 V; Input Voltage (Vi): 0 to 4.6 V; Output Voltage (Vo): 0 to Vcc; Output High Current (Ioh): -24 mA; Output Low Current (Iol): 24 mA; Propagation Delay (tpd): 3.1ns
footprint SOIC14-150(50) (SOIC 14 Leads; Row Spacing 3.81 mm; Pitch 1.27 mm; 3D André L´Hérault)
footprint SOP14-5.3mm(1.27mm) (Small Outline Package 14 pin)
footprint SOP14-4.4mm(0.65mm) (Thin Shrink Small Outline Package 14 pin)
footprint SOP14-4.4mm(0.4mm) (Footprint not found)
part A pins: 1 OE1 (in), 2 A1 (in), 3 Y1 (hiz), 7 GND, 14 Vcc
part B pins: 4 OE2 (in), 5 A2 (in), 6 Y2 (hiz)
part C pins: 8 Y3 (hiz), 9 A3 (in), 10 OE3 (in)
part D pins: 11 Y4 (hiz), 12 A4 (in), 13 OE4 (in)
part A text: A
part B text: B
part C text: C
part D text: D

## SN74ALVC244
designator U?
Octal Buffer/Driver with 3-State Outputs; Supply Voltage (Vcc): 1.65 to 3.6 V; Input Voltage (Vi): 0 to 4.6 V; Output Voltage (Vo): 0 to Vcc; Output High Current (Ioh): -24 mA; Output Low Current (Iol): 24 mA; Propagation Delay (tpd): 2.8ns
footprint SOIC20-300(50) (SOIC 20 Leads; Row Spacing 7.62 mm; Pitch 1.27 mm; 3D André L´Hérault)
footprint SOP20-5.3mm(1.27mm) (Footprint not found)
footprint SOP20-4.4mm(0.65mm) (Footprint not found)
footprint SOP20-4.4mm(0.4mm) (Footprint not found)
part A pins: 1 ~{OE} (in), 2 A1 (in), 4 A2 (in), 6 A3 (in), 8 A4 (in), 10 GND (power), 12 Y4 (hiz), 14 Y3 (hiz), 16 Y2 (hiz), 18 Y1 (hiz), 20 Vcc (power)
part B pins: 3 Y8 (hiz), 5 Y7 (hiz), 7 Y6 (hiz), 9 Y5 (hiz), 11 A5 (in), 13 A6 (in), 15 A7 (in), 17 A8 (in), 19 ~{OE} (in)
part A text: A
part B text: B

## SN74AVC1T45
designator U?
Single-Bit Dual-Supply Bus Transceiver with Configurable Voltage Translation and 3-State Outputs; Supply Voltage (Vcc): 1.2 to 3.6 V; Input Voltage (Vi): 0 to 4.6 V; Output Voltage (Vo): 0 to Vcc; Output High Current (Ioh): -12 mA; Output Low Current (Iol): 12 mA; Max Data Rate: 500 Mbps
footprint SOT-23/6 (Small Outline Transistor 6 leads)
pins: 1 VccA (power), 2 GND (power), 3 A (io), 4 B (io), 5 DIR (in), 6 VccB (power)

## SN74AVCH1T45
designator U?
Single-Bit Dual-Supply Bus Transceiver with Configurable Voltage Translation and 3-State Outputs; Supply Voltage (Vcc): 1.2 to 3.6 V; Input Voltage (Vi): 0 to 4.6 V; Output Voltage (Vo): 0 to Vcc; Output High Current (Ioh): -12 mA; Output Low Current (Iol): 12 mA; Max Data Rate: 380 Mbps
footprint SOT-23/6 (Small Outline Transistor 6 leads)
pins: 1 VccA (power), 2 GND (power), 3 A (io), 4 B (io), 5 DIR (in), 6 VccB (power)

## SN74HC125
designator U?
Quadruple Bus Buffer Gates with 3-State Outputs; Supply Voltage (Vcc): 2.0 to 6.0 V; Input Voltage (Vi): 0 to Vcc; Output High Current (Ioh): -6 mA; Output Low Current (Iol): 6 mA; Propagation Delay (tpd): 11ns; Output Voltage (Vo): 0 to Vcc
footprint DIP14-300(100) (DIP, 14-Leads, Row Spacing 7.62mm, Pitch 2.54mm)
footprint SOIC14-150(50) (SOIC 14 Leads; Row Spacing 3.81 mm; Pitch 1.27 mm; 3D André L´Hérault)
footprint SOP14-5.3mm(1.27mm) (Small Outline Package 14 pin)
footprint SOP14-4.4mm(0.65mm) (Thin Shrink Small Outline Package 14 pin)
footprint SOP14-5.3mm(0.65mm) (Small Outline Package 14 pin)
part A pins: 1 ~{OE1} (in), 2 A1 (in), 3 Y1 (hiz), 7 GND, 14 Vcc
part B pins: 4 ~{OE2} (in), 5 A2 (in), 6 Y2 (hiz)
part C pins: 8 Y3 (hiz), 9 A3 (in), 10 ~{OE3} (in)
part D pins: 11 Y4 (hiz), 12 A4 (in), 13 ~{OE4} (in)
part A text: A
part B text: B
part C text: C
part D text: D

## SN74HC126
designator U?
Quadruple Bus Buffer Gates with 3-State Outputs; Supply Voltage (Vcc): 2.0 to 6.0 V; Input Voltage (Vi): 0 to Vcc; Output High Current (Ioh): -6 mA; Output Low Current (Iol): 6 mA; Propagation Delay (tpd): 11ns; Output Voltage (Vo): 0 to Vcc
footprint DIP14-300(100) (DIP, 14-Leads, Row Spacing 7.62mm, Pitch 2.54mm)
footprint SOIC14-150(50) (SOIC 14 Leads; Row Spacing 3.81 mm; Pitch 1.27 mm; 3D André L´Hérault)
footprint SOP14-5.3mm(0.65mm) (Small Outline Package 14 pin)
footprint SOP14-5.3mm(1.27mm) (Small Outline Package 14 pin)
footprint SOP14-4.4mm(0.65mm) (Thin Shrink Small Outline Package 14 pin)
part A pins: 1 OE1 (in), 2 A1 (in), 3 Y1 (hiz), 7 GND, 14 Vcc
part B pins: 4 OE2 (in), 5 A2 (in), 6 Y2 (hiz)
part C pins: 8 Y3 (hiz), 9 A3 (in), 10 OE3 (in)
part D pins: 11 Y4 (hiz), 12 A4 (in), 13 OE4 (in)
part A text: A
part B text: B
part C text: C
part D text: D

## SN74HC138
designator U?
3-Line to 8-Line Decoder / Demultiplexer; Output Voltage (Vo): 0 to Vcc; Supply Voltage (Vcc): 2.0 to 6.0 V; Propagation Delay High-Low (tphl): 38ns; Output High Current (Ioh): -25 mA; Output Low Current (Iol): 25 mA; Input Voltage (Vi): 0 to Vcc; Propagation Delay Low-High (tplh): 38ns
footprint SOIC16-150(50) (Plastic Small Outline 16 pinos)
footprint DIP16-300(100) (DIP, 16-Leads, Row Spacing 7.62mm, Pitch 2.54mm, Body 22.86x6.35mm)
footprint SOP16-4.4mm(0.65mm) (Footprint not found)
footprint SOP16-5.3mm(0.65mm) (Footprint not found)
footprint SOP16-5.3mm(1.27mm) (Small Outline Package 16 pin)
pins: 1 S0 (in), 2 S1 (in), 3 S2 (in), 4 ~{OE2A} (in), 5 ~{OE2B} (in), 6 OE1 (in), 7 ~{Y7} (out), 8 GND (power), 9 ~{Y6} (out), 10 ~{Y5} (out), 11 ~{Y4} (out), 12 ~{Y3} (out), 13 ~{Y2} (out), 14 ~{Y1} (out), 15 ~{Y0} (out), 16 Vcc (power)

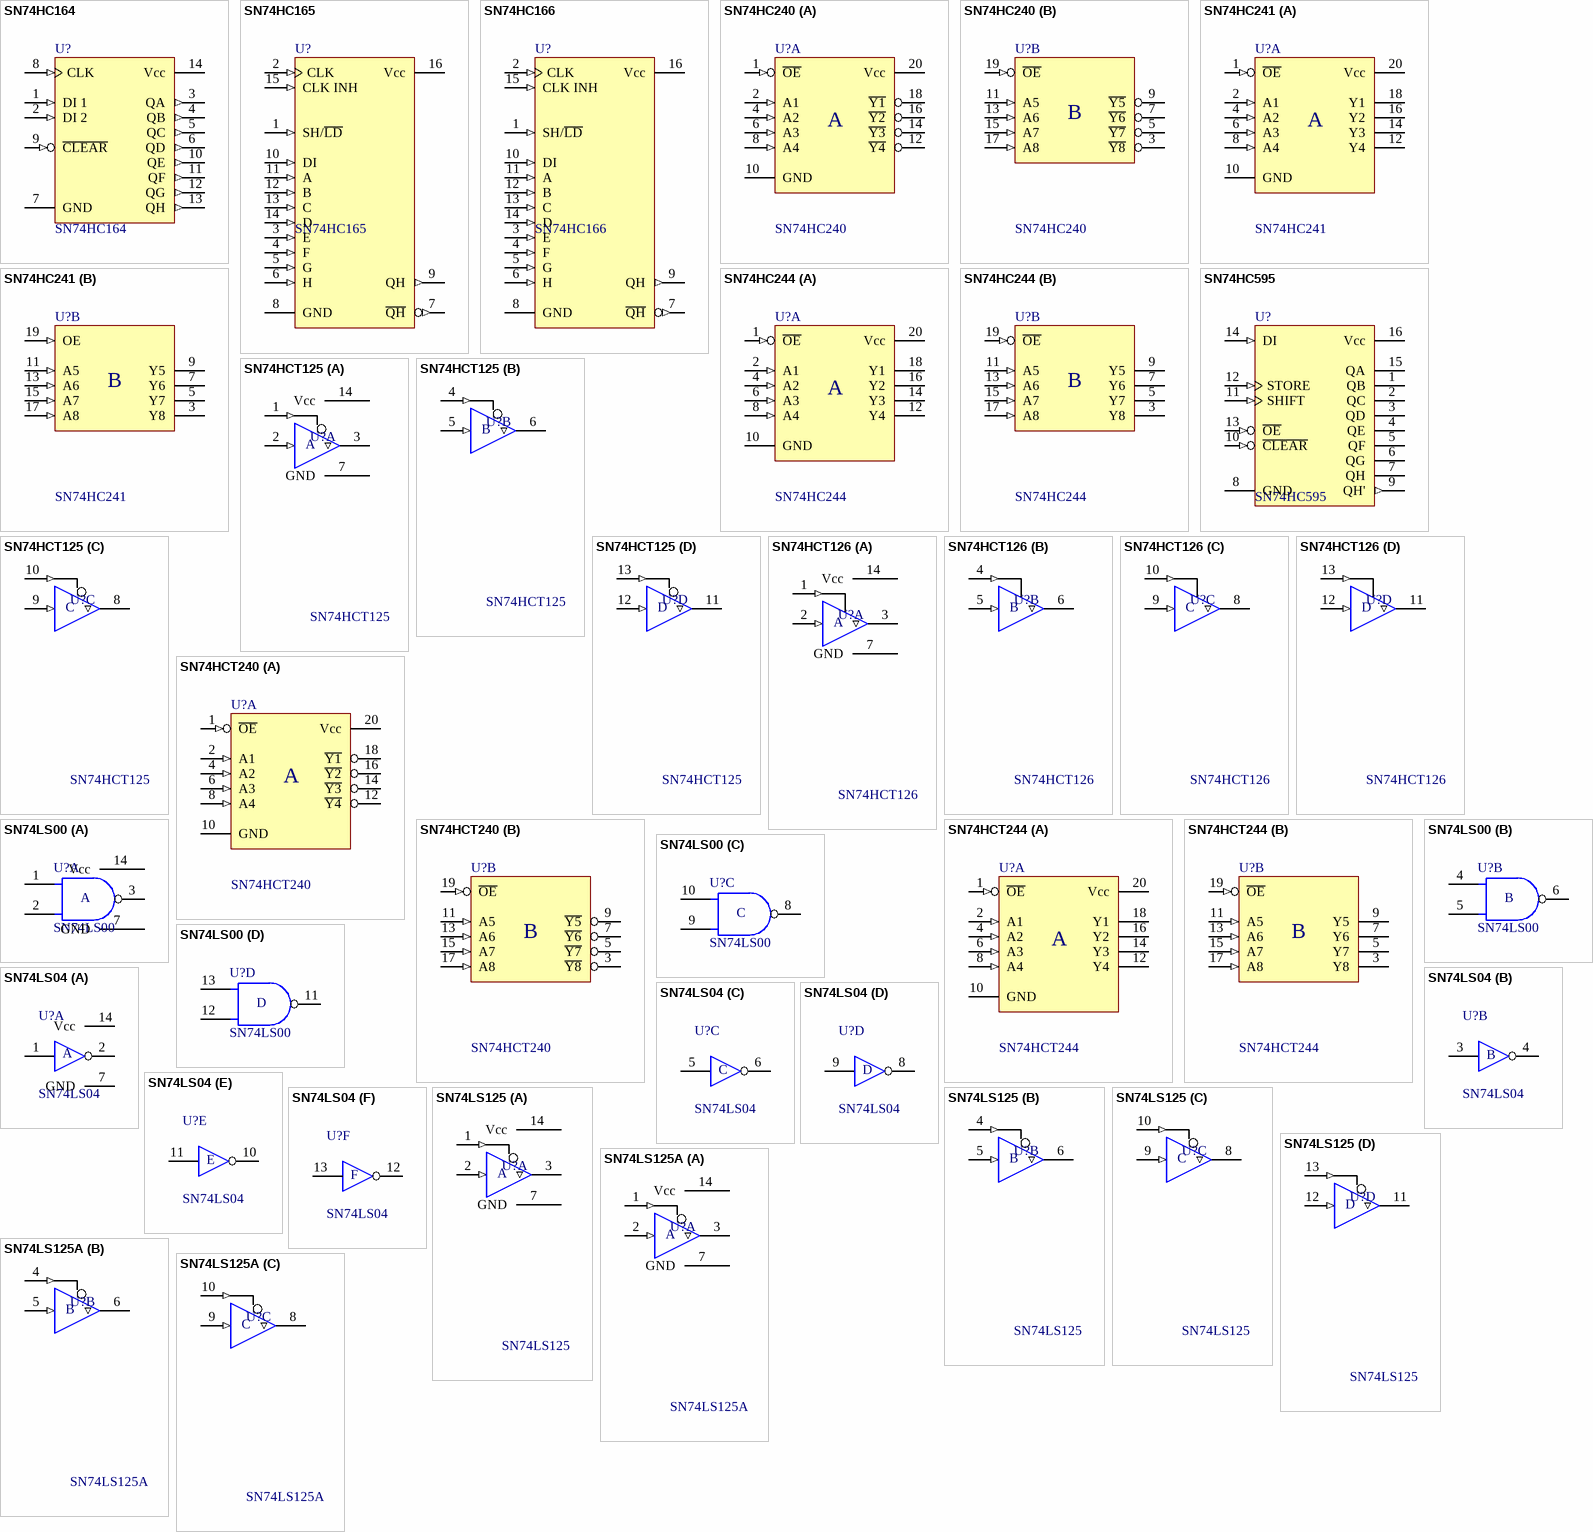
[diagram p3: symbols SN74HC164 to SN74LS125A]

## SN74HC164
designator U?
8-bit Parallel-Out Serial Shift Registers; Supply Voltage (Vcc): 2.0 to 6.0 V; Input Voltage (Vi): 0 to Vcc; Output High Current (Ioh): -4 mA; Output Low Current (Iol): 4 mA; Clock Frequency (fclock): 25 MHz; Output Voltage (Vo): 0 to Vcc
footprint DIP14-300(100) (DIP, 14-Leads, Row Spacing 7.62mm, Pitch 2.54mm)
footprint SOIC14-150(50) (SOIC 14 Leads; Row Spacing 3.81 mm; Pitch 1.27 mm; 3D André L´Hérault)
footprint SOP14-5.3mm(1.27mm) (Small Outline Package 14 pin)
footprint SOP14-4.4mm(0.65mm) (Thin Shrink Small Outline Package 14 pin)
pins: 1 DI 1 (in), 2 DI 2 (in), 3 QA (out), 4 QB (out), 5 QC (out), 6 QD (out), 7 GND (power), 8 CLK (in), 9 ~{CLEAR} (in), 10 QE (out), 11 QF (out), 12 QG (out), 13 QH (out), 14 Vcc (power)

## SN74HC165
designator U?
Parallel-Load 8-bit Shift Registers; Supply Voltage (Vcc): 2.0 to 6.0 V; Input Voltage (Vi): 0 to Vcc; Output High Current (Ioh): -4 mA; Output Low Current (Iol): 4 mA; Clock Frequency (fclock): 25 MHz; Output Voltage (Vo): 0 to Vcc
footprint DIP16-300(100) (DIP, 16-Leads, Row Spacing 7.62mm, Pitch 2.54mm, Body 22.86x6.35mm)
footprint SOIC16-150(50) (SOIC 16 Leads; Row Spacing 3.81 mm; Pitch 1.27 mm; 3D André L´Hérault)
footprint SOP16-4.4mm(0.65mm) (Thin Shrink Small Outline Package 16 pin)
footprint SOP16-5.3mm(0.65mm) (Small Outline Package 16 pin)
footprint SOP16-5.3mm(1.27mm) (Small Outline Package 16 pin)
pins: 1 SH/~{LD} (in), 2 CLK (in), 3 E (in), 4 F (in), 5 G (in), 6 H (in), 7 ~{QH} (out), 8 GND (power), 9 QH (out), 10 DI (in), 11 A (in), 12 B (in), 13 C (in), 14 D (in), 15 CLK INH (in), 16 Vcc (power)

## SN74HC166
designator U?
Parallel-Load 8-bit Shift Registers; Supply Voltage (Vcc): 2.0 to 6.0 V; Input Voltage (Vi): 0 to Vcc; Output High Current (Ioh): -4 mA; Output Low Current (Iol): 4 mA; Clock Frequency (fclock): 25 MHz; Output Voltage (Vo): 0 to Vcc
footprint DIP16-300(100) (DIP, 16-Leads, Row Spacing 7.62mm, Pitch 2.54mm, Body 22.86x6.35mm)
footprint SOIC16-150(50) (SOIC 16 Leads; Row Spacing 3.81 mm; Pitch 1.27 mm; 3D André L´Hérault)
footprint SOP16-4.4mm(0.65mm) (Thin Shrink Small Outline Package 16 pin)
footprint SOP16-5.3mm(0.65mm) (Small Outline Package 16 pin)
footprint SOP16-5.3mm(1.27mm) (Small Outline Package 16 pin)
pins: 1 SH/~{LD} (in), 2 CLK (in), 3 E (in), 4 F (in), 5 G (in), 6 H (in), 7 ~{QH} (out), 8 GND (power), 9 QH (out), 10 DI (in), 11 A (in), 12 B (in), 13 C (in), 14 D (in), 15 CLK INH (in), 16 Vcc (power)

## SN74HC240
designator U?
Octal Buffer/Driver with 3-State Outputs; Supply Voltage (Vcc): 2.0 to 6.0 V; Input Voltage (Vi): 0 to Vcc; Output High Current (Ioh): -6 mA; Output Low Current (Iol): 6 mA; Propagation Delay (tpd): 9ns; Output Voltage (Vo): 0 to Vcc
footprint SOIC20-300(50) (SOIC 20 Leads; Row Spacing 7.62 mm; Pitch 1.27 mm; 3D André L´Hérault)
footprint SOP20-5.3mm(1.27mm) (Footprint not found)
footprint DIP20-300(100) (Footprint not found)
footprint SOP20-5.3mm(0.65mm) (Small Outline Package 20 pin)
footprint SOP20-4.4mm(0.65mm) (Thin Shrink Small Outline Package 20 pin)
part A pins: 1 ~{OE} (in), 2 A1 (in), 4 A2 (in), 6 A3 (in), 8 A4 (in), 10 GND (power), 12 ~{Y4} (hiz), 14 ~{Y3} (hiz), 16 ~{Y2} (hiz), 18 ~{Y1} (hiz), 20 Vcc (power)
part B pins: 3 ~{Y8} (hiz), 5 ~{Y7} (hiz), 7 ~{Y6} (hiz), 9 ~{Y5} (hiz), 11 A5 (in), 13 A6 (in), 15 A7 (in), 17 A8 (in), 19 ~{OE} (in)
part A text: A
part B text: B

## SN74HC241
designator U?
Octal Buffer/Driver with 3-State Outputs; Supply Voltage (Vcc): 2.0 to 6.0 V; Input Voltage (Vi): 0 to Vcc; Output High Current (Ioh): -6 mA; Output Low Current (Iol): 6 mA; Propagation Delay (tpd): 11ns; Output Voltage (Vo): 0 to Vcc
footprint SOIC20-300(50) (SOIC 20 Leads; Row Spacing 7.62 mm; Pitch 1.27 mm; 3D André L´Hérault)
footprint SOP20-5.3mm(1.27mm) (Footprint not found)
footprint DIP20-300(100) (Footprint not found)
footprint SOP20-4.4mm(0.65mm) (Thin Shrink Small Outline Package 20 pin)
part A pins: 1 ~{OE} (in), 2 A1 (in), 4 A2 (in), 6 A3 (in), 8 A4 (in), 10 GND (power), 12 Y4 (hiz), 14 Y3 (hiz), 16 Y2 (hiz), 18 Y1 (hiz), 20 Vcc (power)
part B pins: 3 Y8 (hiz), 5 Y7 (hiz), 7 Y6 (hiz), 9 Y5 (hiz), 11 A5 (in), 13 A6 (in), 15 A7 (in), 17 A8 (in), 19 OE (in)
part A text: A
part B text: B

## SN74HC244
designator U?
Octal Buffer/Driver with 3-State Outputs; Supply Voltage (Vcc): 2.0 to 6.0 V; Input Voltage (Vi): 0 to Vcc; Output High Current (Ioh): -6 mA; Output Low Current (Iol): 6 mA; Propagation Delay (tpd): 11ns; Output Voltage (Vo): 0 to Vcc
footprint SOIC20-300(50) (SOIC 20 Leads; Row Spacing 7.62 mm; Pitch 1.27 mm; 3D André L´Hérault)
footprint SOP20-5.3mm(1.27mm) (Footprint not found)
footprint SOP20-4.4mm(0.65mm) (Footprint not found)
footprint SOP20-5.3mm(0.65mm) (Small Outline Package 20 pin)
footprint DIP20-300(100) (Footprint not found)
part A pins: 1 ~{OE} (in), 2 A1 (in), 4 A2 (in), 6 A3 (in), 8 A4 (in), 10 GND (power), 12 Y4 (hiz), 14 Y3 (hiz), 16 Y2 (hiz), 18 Y1 (hiz), 20 Vcc (power)
part B pins: 3 Y8 (hiz), 5 Y7 (hiz), 7 Y6 (hiz), 9 Y5 (hiz), 11 A5 (in), 13 A6 (in), 15 A7 (in), 17 A8 (in), 19 ~{OE} (in)
part A text: A
part B text: B

## SN74HC595
designator U?
8-Bit Shift Register with 3-State Output Registers; Supply Voltage (Vcc): 2.0 to 6.0 V; Input Voltage (Vi): 0 to Vcc; Output High Current (Ioh): -6 mA; Output Low Current (Iol): 6 mA; Clock Frequency (fclock): 36 MHz; Output Voltage (Vo): 0 to Vcc
footprint SOIC16-150(50) (SOIC; 16 Leads; Row Spacing 3.81 mm; Pitch 1.27 mm; 3D Antonio Fagaldo)
footprint DIP16-300(100) (DIP, 16-Leads, Row Spacing 7.62mm, Pitch 2.54mm, Body 22.86x6.35mm)
footprint SOIC16-300(50) (SOIC 16 Leads; Row Spacing 7.62 mm; Pitch 1.27 mm; 3D André L´Hérault)
footprint SOP16-4.4mm(0.65mm) (Thin Shrink Small Outline Package 16 pin)
footprint SOP16-5.3mm(0.65mm) (Small Outline Package 16 pin)
footprint SOP16-5.3mm(1.27mm) (Small Outline Package 16 pin)
pins: 1 QB (hiz), 2 QC (hiz), 3 QD (hiz), 4 QE (hiz), 5 QF (hiz), 6 QG (hiz), 7 QH (hiz), 8 GND (power), 9 QH' (out), 10 ~{CLEAR} (in), 11 SHIFT (in), 12 STORE (in), 13 ~{OE} (in), 14 DI (in), 15 QA (hiz), 16 Vcc (power)

## SN74HCT125
designator U?
Quadruple Bus Buffer Gates with 3-State Outputs; Supply Voltage (Vcc): 4.5 to 5.5 V; Input Voltage (Vi): 0 to Vcc; Output High Current (Ioh): -6 mA; Output Low Current (Iol): 6 mA; Propagation Delay (tpd): 12ns; Output Voltage (Vo): 0 to Vcc
footprint DIP14-300(100) (DIP, 14-Leads, Row Spacing 7.62mm, Pitch 2.54mm)
footprint SOIC14-150(50) (SOIC 14 Leads; Row Spacing 3.81 mm; Pitch 1.27 mm; 3D André L´Hérault)
part A pins: 1 ~{OE1} (in), 2 A1 (in), 3 Y1 (hiz), 7 GND, 14 Vcc
part B pins: 4 ~{OE2} (in), 5 A2 (in), 6 Y2 (hiz)
part C pins: 8 Y3 (hiz), 9 A3 (in), 10 ~{OE3} (in)
part D pins: 11 Y4 (hiz), 12 A4 (in), 13 ~{OE4} (in)
part A text: A
part B text: B
part C text: C
part D text: D

## SN74HCT126
designator U?
Quadruple Bus Buffer Gates with 3-State Outputs; Supply Voltage (Vcc): 4.5 to 5.5 V; Input Voltage (Vi): 0 to Vcc; Output High Current (Ioh): -6 mA; Output Low Current (Iol): 6 mA; Propagation Delay (tpd): 12ns; Output Voltage (Vo): 0 to Vcc
footprint DIP14-300(100) (DIP, 14-Leads, Row Spacing 7.62mm, Pitch 2.54mm)
footprint SOIC14-150(50) (SOIC 14 Leads; Row Spacing 3.81 mm; Pitch 1.27 mm; 3D André L´Hérault)
part A pins: 1 OE1 (in), 2 A1 (in), 3 Y1 (hiz), 7 GND, 14 Vcc
part B pins: 4 OE2 (in), 5 A2 (in), 6 Y2 (hiz)
part C pins: 8 Y3 (hiz), 9 A3 (in), 10 OE3 (in)
part D pins: 11 Y4 (hiz), 12 A4 (in), 13 OE4 (in)
part A text: A
part B text: B
part C text: C
part D text: D

## SN74HCT240
designator U?
Octal Buffer/Driver with 3-State Outputs; Supply Voltage (Vcc): 4.5 to 5.5 V; Input Voltage (Vi): 0 to Vcc; Output High Current (Ioh): -6 mA; Output Low Current (Iol): 6 mA; Propagation Delay (tpd): 12ns; Output Voltage (Vo): 0 to Vcc
footprint SOIC20-300(50) (SOIC 20 Leads; Row Spacing 7.62 mm; Pitch 1.27 mm; 3D André L´Hérault)
footprint SOP20-5.3mm(1.27mm) (Footprint not found)
footprint DIP20-300(100) (Footprint not found)
footprint SOP20-4.4mm(0.65mm) (Thin Shrink Small Outline Package 20 pin)
part A pins: 1 ~{OE} (in), 2 A1 (in), 4 A2 (in), 6 A3 (in), 8 A4 (in), 10 GND (power), 12 ~{Y4} (hiz), 14 ~{Y3} (hiz), 16 ~{Y2} (hiz), 18 ~{Y1} (hiz), 20 Vcc (power)
part B pins: 3 ~{Y8} (hiz), 5 ~{Y7} (hiz), 7 ~{Y6} (hiz), 9 ~{Y5} (hiz), 11 A5 (in), 13 A6 (in), 15 A7 (in), 17 A8 (in), 19 ~{OE} (in)
part A text: A
part B text: B

## SN74HCT244
designator U?
Octal Buffer/Driver with 3-State Outputs; Supply Voltage (Vcc): 4.5 to 5.5 V; Input Voltage (Vi): 0 to Vcc; Output High Current (Ioh): -6 mA; Output Low Current (Iol): 6 mA; Propagation Delay (tpd): 13ns; Output Voltage (Vo): 0 to Vcc
footprint SOIC20-300(50) (SOIC 20 Leads; Row Spacing 7.62 mm; Pitch 1.27 mm; 3D André L´Hérault)
footprint SOP20-5.3mm(1.27mm) (Footprint not found)
footprint SOP20-4.4mm(0.65mm) (Footprint not found)
footprint SOP20-5.3mm(0.65mm) (Small Outline Package 20 pin)
footprint DIP20-300(100) (Footprint not found)
part A pins: 1 ~{OE} (in), 2 A1 (in), 4 A2 (in), 6 A3 (in), 8 A4 (in), 10 GND (power), 12 Y4 (hiz), 14 Y3 (hiz), 16 Y2 (hiz), 18 Y1 (hiz), 20 Vcc (power)
part B pins: 3 Y8 (hiz), 5 Y7 (hiz), 7 Y6 (hiz), 9 Y5 (hiz), 11 A5 (in), 13 A6 (in), 15 A7 (in), 17 A8 (in), 19 ~{OE} (in)
part A text: A
part B text: B

## SN74LS00
designator U?
Quad 2-Input NAND Gate; Supply Voltage (Vcc): 4.75 to 5.25 V; Input Voltage (Vi): 0 to Vcc; Output High Current (Ioh): -0.4 mA; Output Low Current (Iol): 8 mA; Propagation Delay High-Low (tphl): 10ns; Propagation Delay Low-High (tplh): 9ns; Output Voltage (Vo): 0 to Vcc
footprint DIP14-300(100) (DIP, 14-Leads, Row Spacing 7.62mm, Pitch 2.54mm)
footprint SOIC14-150(50) (SOIC 14 Leads; Row Spacing 3.81 mm; Pitch 1.27 mm; 3D André L´Hérault)
footprint SOP14-5.3mm(1.27mm) (Small Outline Package 14 pin)
footprint SOP14-5.3mm(0.65mm) (Small Outline Package 14 pin)
part A pins: 1 A0, 2 B0, 3 Y0, 7 GND, 14 Vcc
part B pins: 4 A1, 5 B1, 6 Y1
part C pins: 8 Y2, 9 B2, 10 A2
part D pins: 11 Y3, 12 B3, 13 A3
part A text: A
part B text: B
part C text: C
part D text: D

## SN74LS04
designator U?
6x Logic Inverter; Input Voltage (Vi): 0 to Vcc; Output High Current (Ioh): -0.4 mA; Output Low Current (Iol): 8 mA; Propagation Delay High-Low (tphl): 10ns; Propagation Delay Low-High (tplh): 9ns; Supply Voltage (Vcc): 4.75 to 5.25 V; Output Voltage (Vo): 0 to Vcc
footprint DIP14-300(100) (DIP, 14-Leads, Row Spacing 7.62mm, Pitch 2.54mm)
footprint SOIC14-150(50) (Plastic Small Outline 14 pinos)
footprint SOP14-5.3mm(1.27mm) (Small Outline Package 14 pin)
footprint SOP14-5.3mm(0.65mm) (Small Outline Package 14 pin)
part A pins: 1 2A, 2 2Y, 7 GND (power), 14 Vcc (power)
part B pins: 3 2A, 4 2Y
part C pins: 5 3A, 6 3Y
part D pins: 8 4Y, 9 4A
part E pins: 10 5Y, 11 5A
part F pins: 12 6Y, 13 6A
part A text: A
part B text: B
part C text: C
part D text: D
part E text: E
part F text: F

## SN74LS125
designator U?
Quadruple Bus Buffer Gates with 3-State Outputs; Supply Voltage (Vcc): 4.75 to 5.25 V; Input Voltage (Vi): 0 to Vcc; Output High Current (Ioh): -5.2 mA; Output Low Current (Iol): 16 mA; Propagation Delay (tpd): 12ns; Output Voltage (Vo): 0 to Vcc
footprint DIP14-300(100) (DIP, 14-Leads, Row Spacing 7.62mm, Pitch 2.54mm)
part A pins: 1 ~{OE1} (in), 2 A1 (in), 3 Y1 (hiz), 7 GND, 14 Vcc
part B pins: 4 ~{OE2} (in), 5 A2 (in), 6 Y2 (hiz)
part C pins: 8 Y3 (hiz), 9 A3 (in), 10 ~{OE3} (in)
part D pins: 11 Y4 (hiz), 12 A4 (in), 13 ~{OE4} (in)
part A text: A
part B text: B
part C text: C
part D text: D

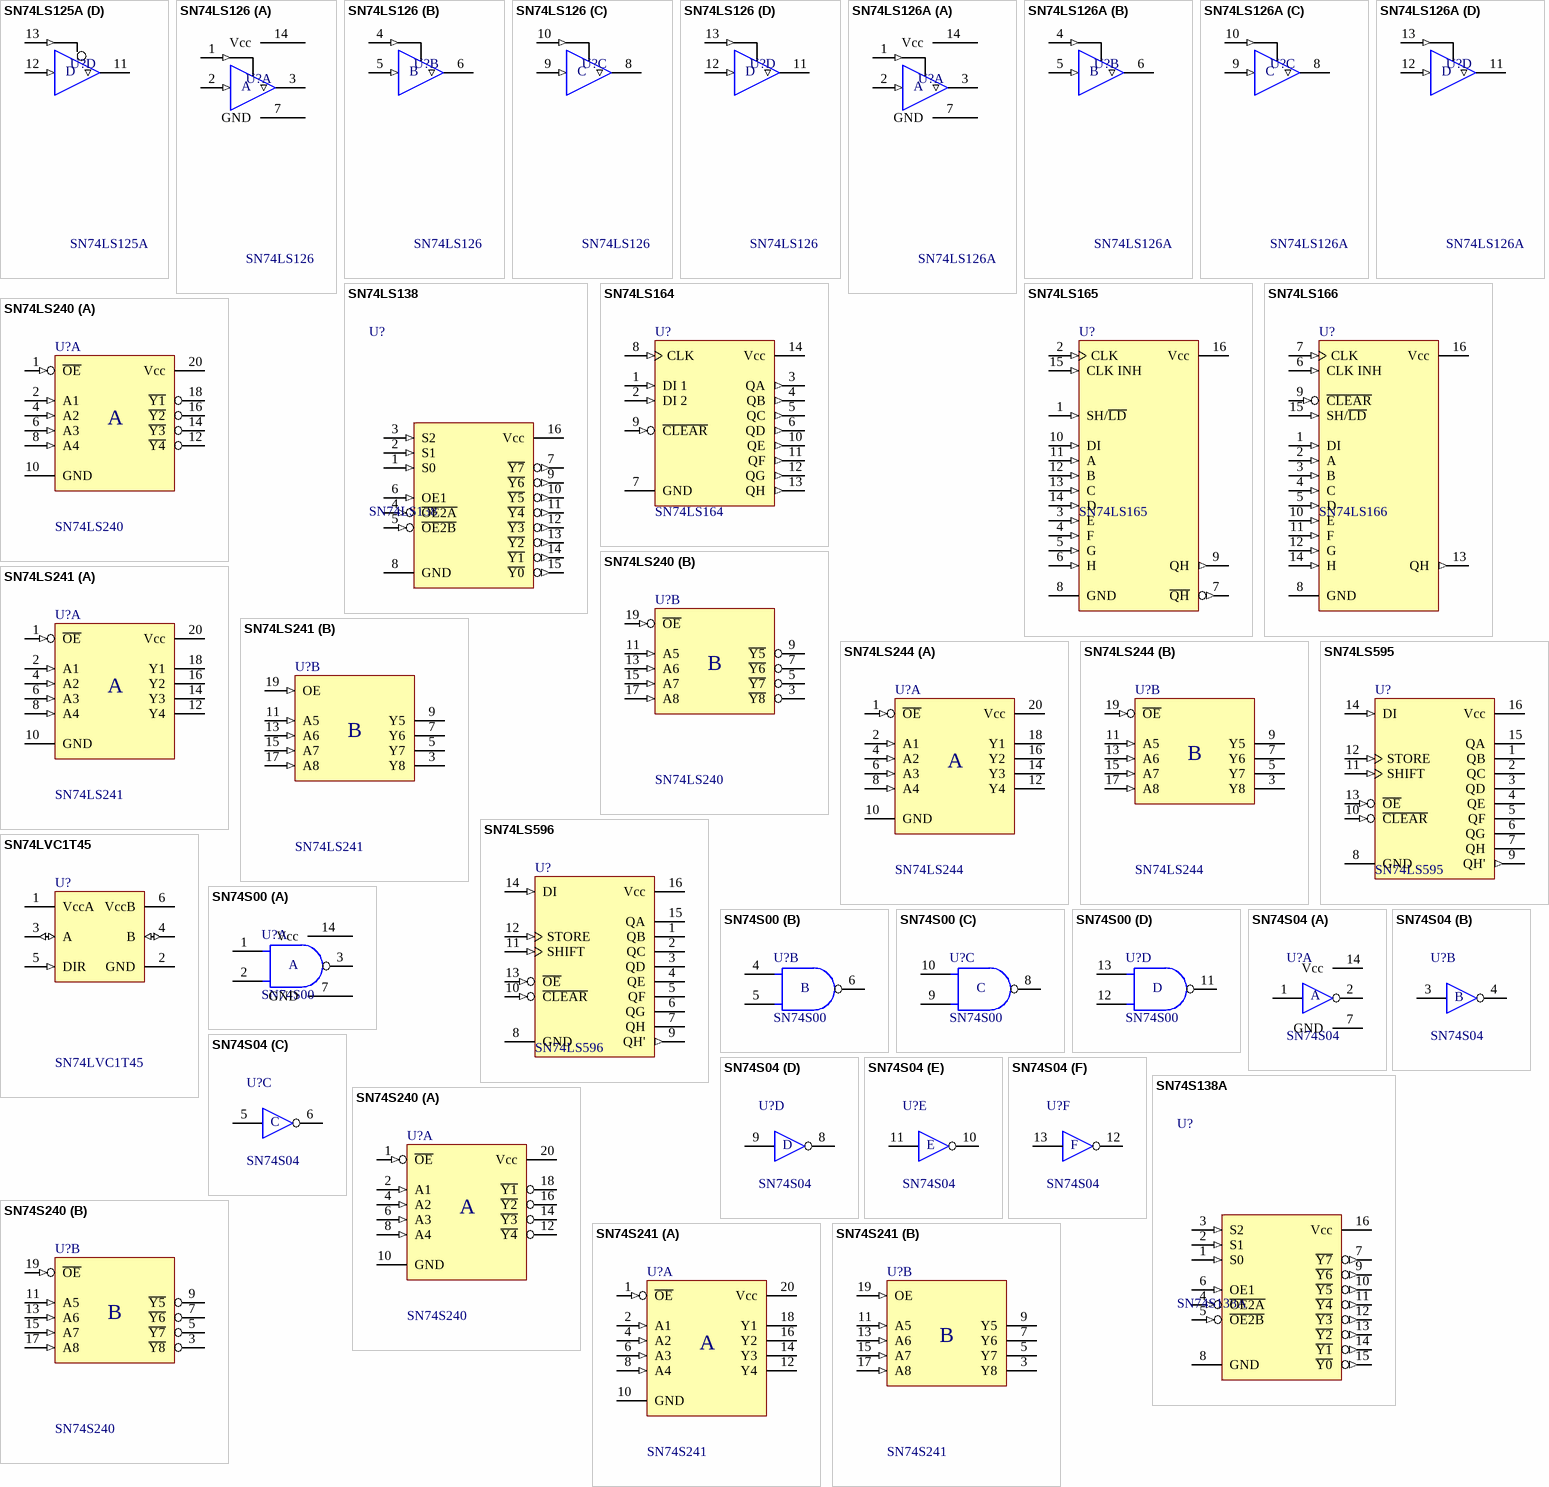
[diagram p4: symbols SN74LS125A to SN74S241]

## SN74LS125A
designator U?
Quadruple Bus Buffer Gates with 3-State Outputs; Supply Voltage (Vcc): 4.75 to 5.25 V; Input Voltage (Vi): 0 to Vcc; Output High Current (Ioh): -5.2 mA; Output Low Current (Iol): 16 mA; Propagation Delay (tpd): 12ns; Output Voltage (Vo): 0 to Vcc
footprint DIP14-300(100) (DIP, 14-Leads, Row Spacing 7.62mm, Pitch 2.54mm)
footprint SOIC14-150(50) (SOIC 14 Leads; Row Spacing 3.81 mm; Pitch 1.27 mm; 3D André L´Hérault)
footprint SOP14-5.3mm(1.27mm) (Small Outline Package 14 pin)
footprint SOP14-5.3mm(0.65mm) (Small Outline Package 14 pin)
part A pins: 1 ~{OE1} (in), 2 A1 (in), 3 Y1 (hiz), 7 GND, 14 Vcc
part B pins: 4 ~{OE2} (in), 5 A2 (in), 6 Y2 (hiz)
part C pins: 8 Y3 (hiz), 9 A3 (in), 10 ~{OE3} (in)
part D pins: 11 Y4 (hiz), 12 A4 (in), 13 ~{OE4} (in)
part A text: A
part B text: B
part C text: C
part D text: D

## SN74LS126
designator U?
Quadruple Bus Buffer Gates with 3-State Outputs; Supply Voltage (Vcc): 4.75 to 5.25 V; Input Voltage (Vi): 0 to Vcc; Output High Current (Ioh): -5.2 mA; Output Low Current (Iol): 16 mA; Propagation Delay (tpd): 12ns; Output Voltage (Vo): 0 to Vcc
footprint DIP14-300(100) (DIP, 14-Leads, Row Spacing 7.62mm, Pitch 2.54mm)
part A pins: 1 OE1 (in), 2 A1 (in), 3 Y1 (hiz), 7 GND, 14 Vcc
part B pins: 4 OE2 (in), 5 A2 (in), 6 Y2 (hiz)
part C pins: 8 Y3 (hiz), 9 A3 (in), 10 OE3 (in)
part D pins: 11 Y4 (hiz), 12 A4 (in), 13 OE4 (in)
part A text: A
part B text: B
part C text: C
part D text: D

## SN74LS126A
designator U?
Quadruple Bus Buffer Gates with 3-State Outputs; Supply Voltage (Vcc): 4.75 to 5.25 V; Input Voltage (Vi): 0 to Vcc; Output High Current (Ioh): -5.2 mA; Output Low Current (Iol): 16 mA; Propagation Delay (tpd): 12ns; Output Voltage (Vo): 0 to Vcc
footprint DIP14-300(100) (DIP, 14-Leads, Row Spacing 7.62mm, Pitch 2.54mm)
footprint SOIC14-150(50) (SOIC 14 Leads; Row Spacing 3.81 mm; Pitch 1.27 mm; 3D André L´Hérault)
footprint SOP14-5.3mm(1.27mm) (Small Outline Package 14 pin)
part A pins: 1 OE1 (in), 2 A1 (in), 3 Y1 (hiz), 7 GND, 14 Vcc
part B pins: 4 OE2 (in), 5 A2 (in), 6 Y2 (hiz)
part C pins: 8 Y3 (hiz), 9 A3 (in), 10 OE3 (in)
part D pins: 11 Y4 (hiz), 12 A4 (in), 13 OE4 (in)
part A text: A
part B text: B
part C text: C
part D text: D

## SN74LS138
designator U?
3-Line to 8-Line Decoders; Output Voltage (Vo): 0 to Vcc; Supply Voltage (Vcc): 4.75 to 5.25 V; Propagation Delay High-Low (tphl): 20ns; Propagation Delay Low-High (tplh): 21ns; Output High Current (Ioh): -0.4 mA; Output Low Current (Iol): 8 mA; Input Voltage (Vi): 0 to Vcc
footprint DIP16-300(100) (Footprint not found)
footprint SOIC16-150(50) (Plastic Small Outline 16 pinos)
pins: 1 S0 (in), 2 S1 (in), 3 S2 (in), 4 ~{OE2A} (in), 5 ~{OE2B} (in), 6 OE1 (in), 7 ~{Y7} (out), 8 GND (power), 9 ~{Y6} (out), 10 ~{Y5} (out), 11 ~{Y4} (out), 12 ~{Y3} (out), 13 ~{Y2} (out), 14 ~{Y1} (out), 15 ~{Y0} (out), 16 Vcc (power)

## SN74LS164
designator U?
8-bit Parallel-Out Serial Shift Registers; Supply Voltage (Vcc): 4.75 to 5.25 V; Input Voltage (Vi): 0 to Vcc; Output High Current (Ioh): -0.8 mA; Output Low Current (Iol): 8 mA; Clock Frequency (fclock): 25 MHz; Output Voltage (Vo): 0 to Vcc
footprint DIP14-300(100) (DIP, 14-Leads, Row Spacing 7.62mm, Pitch 2.54mm)
footprint SOIC14-150(50) (SOIC 14 Leads; Row Spacing 3.81 mm; Pitch 1.27 mm; 3D André L´Hérault)
footprint SOP14-5.3mm(1.27mm) (Small Outline Package 14 pin)
pins: 1 DI 1 (in), 2 DI 2 (in), 3 QA (out), 4 QB (out), 5 QC (out), 6 QD (out), 7 GND (power), 8 CLK (in), 9 ~{CLEAR} (in), 10 QE (out), 11 QF (out), 12 QG (out), 13 QH (out), 14 Vcc (power)

## SN74LS165
designator U?
Parallel-Load 8-bit Shift Registers; Supply Voltage (Vcc): 4.75 to 5.25 V; Input Voltage (Vi): 0 to Vcc; Output High Current (Ioh): -0.8 mA; Output Low Current (Iol): 8 mA; Clock Frequency (fclock): 25 MHz; Output Voltage (Vo): 0 to Vcc
footprint DIP16-300(100) (DIP, 16-Leads, Row Spacing 7.62mm, Pitch 2.54mm, Body 22.86x6.35mm)
footprint SOIC16-150(50) (SOIC 16 Leads; Row Spacing 3.81 mm; Pitch 1.27 mm; 3D André L´Hérault)
footprint SOP16-5.3mm(1.27mm) (Small Outline Package 16 pin)
pins: 1 SH/~{LD} (in), 2 CLK (in), 3 E (in), 4 F (in), 5 G (in), 6 H (in), 7 ~{QH} (out), 8 GND (power), 9 QH (out), 10 DI (in), 11 A (in), 12 B (in), 13 C (in), 14 D (in), 15 CLK INH (in), 16 Vcc (power)